# EAGLE library part FH12-22S-0.5SVA_54_ (library FH12-22S-0.5SVA_54_)
CONN FFC VERT 22POS 0.50MM SMD Source: Datasheet <https://www.hirose.com/en/product/document?clcode=CL0586-0813-6-54&productname=FH12-22S-0.5SVA(54)&series=FH12&documenttype=Catalog&lang=en&documentid=D31648_en>
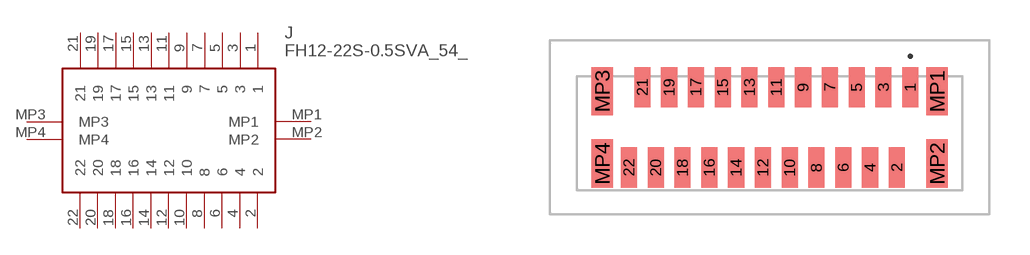
[diagram p0: symbol with the pads of FH1222S05SVA54; footprint FH1222S05SVA54]

Designator prefix J

## FH12-22S-0.5SVA_54_ (Description: CONN FFC VERT 22POS 0.50MM SMD; Height: 5.7mm; Manufacturer_Name: Hirose; Manufacturer_Part_Number: FH12-22S-0.5SVA(54); Mouser_Part_Number: 798-FH1222S0.5SVA54; Mouser_Price-Stock: https://www.mouser.co.uk/ProductDetail/Hirose-Connector/FH12-22S-0.5SVA54?qs=Gufeu08L%2Fl2Z7MeB1X5%252BAA%3D%3D)  [FH1222S05SVA54]
1  1
2  2
3  3
4  4
5  5
6  6
7  7
8  8
9  9
10  10
11  11
12  12
13  13
14  14
15  15
16  16
17  17
18  18
19  19
20  20
21  21
22  22
MP1  MP1
MP2  MP2
MP3  MP3
MP4  MP4

## Footprint FH1222S05SVA54 (pad centres in mm)
FH12-22S-0.5SVA(54)-4
smd 0.6 x 1.5: 1 5.25,1.5; 2 4.75,-1.5; 3 4.25,1.5; 4 3.75,-1.5; 5 3.25,1.5; 6 2.75,-1.5; 7 2.25,1.5; 8 1.75,-1.5; 9 1.25,1.5; 10 0.75,-1.5; 11 0.25,1.5; 12 -0.25,-1.5; 13 -0.75,1.5; 14 -1.25,-1.5; 15 -1.75,1.5; 16 -2.25,-1.5; 17 -2.75,1.5; 18 -3.25,-1.5; 19 -3.75,1.5; 20 -4.25,-1.5; 21 -4.75,1.5; 22 -5.25,-1.5
smd 0.8 x 1.8: MP1 6.25,1.35; MP2 6.25,-1.35; MP3 -6.25,1.35; MP4 -6.25,-1.35